# Altium footprint library macropad1.PcbLib: 4 footprints
Each footprint in its own frame and in the unit in brackets; x right, y up, seen from the top. Pads: shape width x height; smd on the part's side, far side on the other; paste and mask are expansions set on the pad; w line width, h text height; cw(c..) or ccw(c..) is an arc to the next point about the centre after c.
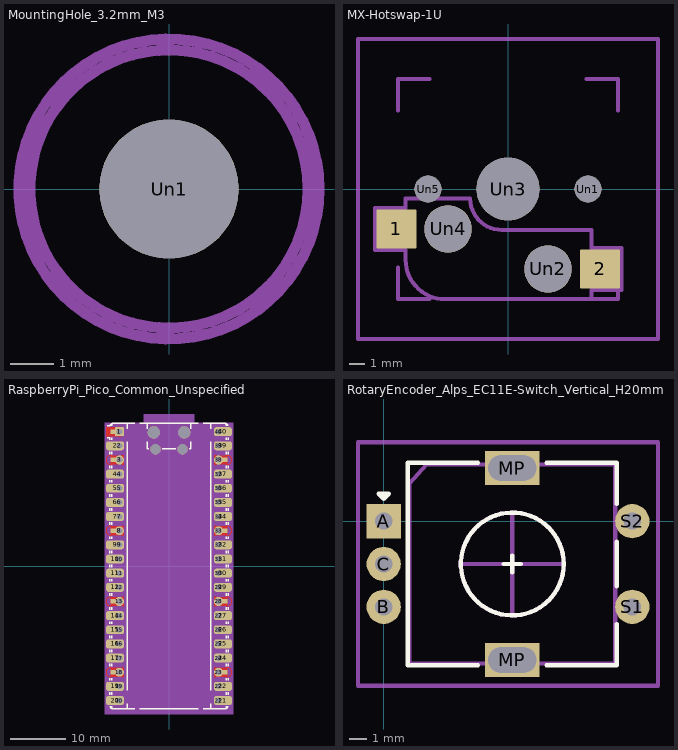
[diagram p0: the footprints below, top view; thin cyan lines are the x and y axes]

## MountingHole_3.2mm_M3 [mm]
pads (1):
  round 3.2 hole 3.2 paste-2539.97 mask+0: Un1(0,0)
Mechanical 6:
  text "'.Designator'" at -0.694,-0.28 h1
Mechanical 7:
  circle w0.254: c0,0 r3.45
Mechanical 12:
  circle w0.254: c0,0 r3.2

## MX-Hotswap-1U [mm]
pads (7):
  rrect8% 2.55x2.5 smd mask+0: 1(-7.085,-2.54) 2(5.842,-5.08)
  round 1.702 hole 1.702 paste-2539.97 mask+0: Un1(5.08,0) Un5(-5.08,0)
  round 3 hole 3 paste-2539.97 mask+0: Un2(2.54,-5.08) Un4(-3.81,-2.54)
  round 3.988 hole 3.988 paste-2539.97 mask+0: Un3(0,0)
Mechanical 8:
  lines w0.254: -8.45,-3.875 -6.5,-3.875 -6.5,-4.5 ccw(c-4,-4.5) -4,-7 5.3,-7 5.3,-6.4 7.2,-6.4 7.2,-3.75 5.3,-3.75 5.3,-2.6 -0.4,-2.6 cw(c-0.4,-0.6) -2.4,-0.6 -6.5,-0.6 -6.5,-1.2 -8.45,-1.2 -8.45,-3.875
Mechanical 13:
  lines w0.254: -7,-5 -7,-7 -5,-7 ; -7,5 -7,7 -5,7 ; 5,-7 7,-7 7,-5 ; 5,7 7,7 7,5 ; -9.525,-9.525 9.525,-9.525 9.525,9.525 -9.525,9.525 -9.525,-9.525

## RaspberryPi_Pico_Common_Unspecified [mm]
pads (84):
  rect 1.6x0.8 smd paste-1.6 mask+0: 1(-9.69,24.13) 3(-9.69,19.05) 8(-9.69,6.35) 13(-9.69,-6.35) 18(-9.69,-19.05) 23(9.69,-19.05) 28(9.69,-6.35) 33(9.69,6.35) 38(9.69,19.05)
  rrect12% 1.6x1.6 hole 1 paste-2539.97 mask+0: 1(-8.89,24.13)
  rrect50% 3.2x1.6 smd paste-3.2 mask+0: 2(-9.69,21.59) 4(-9.69,16.51) 5(-9.69,13.97) 6(-9.69,11.43) 7(-9.69,8.89) 9(-9.69,3.81) 10(-9.69,1.27) 11(-9.69,-1.27) 12(-9.69,-3.81) 14(-9.69,-8.89) 15(-9.69,-11.43) 16(-9.69,-13.97) 17(-9.69,-16.51) 19(-9.69,-21.59) 20(-9.69,-24.13) 21(9.69,-24.13) 22(9.69,-21.59) 24(9.69,-16.51) 25(9.69,-13.97) 26(9.69,-11.43) 27(9.69,-8.89) 29(9.69,-3.81) 30(9.69,-1.27) 31(9.69,1.27) 32(9.69,3.81) 34(9.69,8.89) 35(9.69,11.43) 36(9.69,13.97) 37(9.69,16.51) 39(9.69,21.59) 40(9.69,24.13)
  round 1.6 hole 1 paste-2539.97 mask+0: 2(-8.89,21.59) 3(-8.89,19.05) 4(-8.89,16.51) 5(-8.89,13.97) 6(-8.89,11.43) 7(-8.89,8.89) 8(-8.89,6.35) 9(-8.89,3.81) 10(-8.89,1.27) 11(-8.89,-1.27) 12(-8.89,-3.81) 13(-8.89,-6.35) 14(-8.89,-8.89) 15(-8.89,-11.43) 16(-8.89,-13.97) 17(-8.89,-16.51) 18(-8.89,-19.05) 19(-8.89,-21.59) 20(-8.89,-24.13) 21(8.89,-24.13) 22(8.89,-21.59) 23(8.89,-19.05) 24(8.89,-16.51) 25(8.89,-13.97) 26(8.89,-11.43) 27(8.89,-8.89) 28(8.89,-6.35) 29(8.89,-3.81) 30(8.89,-1.27) 31(8.89,1.27) 32(8.89,3.81) 33(8.89,6.35) 34(8.89,8.89) 35(8.89,11.43) 36(8.89,13.97) 37(8.89,16.51) 38(8.89,19.05) 39(8.89,21.59) 40(8.89,24.13)
  round 2.2 hole 2.2 paste-2539.97 mask+0: Un1(-2.725,24) Un4(2.725,24)
  round 1.85 hole 1.85 paste-2539.97 mask+0: Un2(-2.425,20.97) Un3(2.425,20.97)
Top Layer:
  circle w0: c-8.89,24.13 r0.8
  circle w0: c-11.09,24.73 r0.2
  circle w0: c-11.09,23.53 r0.2
  circle w0: c-10.49,19.05 r0.8
  circle w0: c-8.29,19.65 r0.2
  circle w0: c-8.29,18.45 r0.2
  circle w0: c-8.29,18.45 r0.2
  circle w0: c-8.29,19.65 r0.2
  circle w0: c-10.49,6.35 r0.8
  circle w0: c-8.29,6.95 r0.2
  circle w0: c-8.29,5.75 r0.2
  circle w0: c-8.29,5.75 r0.2
  circle w0: c-8.29,6.95 r0.2
  circle w0: c-10.49,-6.35 r0.8
  circle w0: c-8.29,-5.75 r0.2
  circle w0: c-8.29,-6.95 r0.2
  circle w0: c-8.29,-6.95 r0.2
  circle w0: c-8.29,-5.75 r0.2
  circle w0: c-10.49,-19.05 r0.8
  circle w0: c-8.29,-18.45 r0.2
  circle w0: c-8.29,-19.65 r0.2
  circle w0: c-8.29,-19.65 r0.2
  circle w0: c-8.29,-18.45 r0.2
  circle w0: c8.29,-19.65 r0.2
  circle w0: c8.29,-18.45 r0.2
  circle w0: c10.49,-19.05 r0.8
  circle w0: c8.29,-18.45 r0.2
  circle w0: c8.29,-19.65 r0.2
  circle w0: c8.29,-6.95 r0.2
  circle w0: c8.29,-5.75 r0.2
  circle w0: c10.49,-6.35 r0.8
  circle w0: c8.29,-5.75 r0.2
  circle w0: c8.29,-6.95 r0.2
  circle w0: c8.29,5.75 r0.2
  circle w0: c8.29,6.95 r0.2
  circle w0: c10.49,6.35 r0.8
  circle w0: c8.29,6.95 r0.2
  circle w0: c8.29,5.75 r0.2
  circle w0: c8.29,18.45 r0.2
  circle w0: c8.29,19.65 r0.2
  circle w0: c10.49,19.05 r0.8
  circle w0: c8.29,19.65 r0.2
  circle w0: c8.29,18.45 r0.2
  region: -8.89,23.33 -11.09,23.33 -11.29,23.53 -11.29,24.73 -11.09,24.93 -8.89,24.93
  region: -8.09,19.65 -8.09,18.45 -8.29,18.25 -10.49,18.25 -10.49,19.85 -8.29,19.85
  region: -8.09,19.65 -8.09,18.45 -8.29,18.25 -8.89,18.25 -8.89,19.85 -8.29,19.85
  region: -8.09,6.95 -8.09,5.75 -8.29,5.55 -10.49,5.55 -10.49,7.15 -8.29,7.15
  region: -8.09,6.95 -8.09,5.75 -8.29,5.55 -8.89,5.55 -8.89,7.15 -8.29,7.15
  region: -8.09,-5.75 -8.09,-6.95 -8.29,-7.15 -10.49,-7.15 -10.49,-5.55 -8.29,-5.55
  region: -8.09,-5.75 -8.09,-6.95 -8.29,-7.15 -8.89,-7.15 -8.89,-5.55 -8.29,-5.55
  region: -8.09,-18.45 -8.09,-19.65 -8.29,-19.85 -10.49,-19.85 -10.49,-18.25 -8.29,-18.25
  region: -8.09,-18.45 -8.09,-19.65 -8.29,-19.85 -8.89,-19.85 -8.89,-18.25 -8.29,-18.25
  region: 8.89,-19.85 8.29,-19.85 8.09,-19.65 8.09,-18.45 8.29,-18.25 8.89,-18.25
  region: 10.49,-19.85 8.29,-19.85 8.09,-19.65 8.09,-18.45 8.29,-18.25 10.49,-18.25
  region: 8.89,-7.15 8.29,-7.15 8.09,-6.95 8.09,-5.75 8.29,-5.55 8.89,-5.55
  region: 10.49,-7.15 8.29,-7.15 8.09,-6.95 8.09,-5.75 8.29,-5.55 10.49,-5.55
  region: 8.89,5.55 8.29,5.55 8.09,5.75 8.09,6.95 8.29,7.15 8.89,7.15
  region: 10.49,5.55 8.29,5.55 8.09,5.75 8.09,6.95 8.29,7.15 10.49,7.15
  region: 8.89,18.25 8.29,18.25 8.09,18.45 8.09,19.65 8.29,19.85 8.89,19.85
  region: 10.49,18.25 8.29,18.25 8.09,18.45 8.09,19.65 8.29,19.85 10.49,19.85
Bottom Layer:
  circle w0: c-8.29,18.45 r0.2
  circle w0: c-8.29,19.65 r0.2
  circle w0: c-8.29,5.75 r0.2
  circle w0: c-8.29,6.95 r0.2
  circle w0: c-8.29,-6.95 r0.2
  circle w0: c-8.29,-5.75 r0.2
  circle w0: c-8.29,-19.65 r0.2
  circle w0: c-8.29,-18.45 r0.2
  circle w0: c8.29,-19.65 r0.2
  circle w0: c8.29,-18.45 r0.2
  circle w0: c8.29,-6.95 r0.2
  circle w0: c8.29,-5.75 r0.2
  circle w0: c8.29,5.75 r0.2
  circle w0: c8.29,6.95 r0.2
  circle w0: c8.29,18.45 r0.2
  circle w0: c8.29,19.65 r0.2
  region: -8.09,19.65 -8.09,18.45 -8.29,18.25 -8.89,18.25 -8.89,19.85 -8.29,19.85
  region: -8.09,6.95 -8.09,5.75 -8.29,5.55 -8.89,5.55 -8.89,7.15 -8.29,7.15
  region: -8.09,-5.75 -8.09,-6.95 -8.29,-7.15 -8.89,-7.15 -8.89,-5.55 -8.29,-5.55
  region: -8.09,-18.45 -8.09,-19.65 -8.29,-19.85 -8.89,-19.85 -8.89,-18.25 -8.29,-18.25
  region: 8.89,-19.85 8.29,-19.85 8.09,-19.65 8.09,-18.45 8.29,-18.25 8.89,-18.25
  region: 8.89,-7.15 8.29,-7.15 8.09,-6.95 8.09,-5.75 8.29,-5.55 8.89,-5.55
  region: 8.89,5.55 8.29,5.55 8.09,5.75 8.09,6.95 8.29,7.15 8.89,7.15
  region: 8.89,18.25 8.29,18.25 8.09,18.45 8.09,19.65 8.29,19.85 8.89,19.85
Top Overlay:
  lines w0.254: -11.09,23.07 -10.61,23.07 -10.61,22.65 ; -11.09,25.19 -10.58,25.19 cw(c-10,25) -10,25.61 -7.51,25.61 ; -10.61,-23.07 -10.61,-22.65 ; -10.61,-20.53 -10.61,-20.11 ; -10.61,-17.99 -10.61,-17.57 ; -10.61,-15.45 -10.61,-15.03 ; -10.61,-12.91 -10.61,-12.49 ; -10.61,-10.37 -10.61,-9.95 ; -10.61,-7.83 -10.61,-7.41 ; -10.61,-5.29 -10.61,-4.87 ; -10.61,-2.75 -10.61,-2.33 ; -10.61,-0.21 -10.61,0.21 ; -10.61,2.33 -10.61,2.75 ; -10.61,4.87 -10.61,5.29 ; -10.61,7.41 -10.61,7.83 ; -10.61,9.95 -10.61,10.37 ; -10.61,12.49 -10.61,12.91 ; -10.61,15.03 -10.61,15.45 ; -10.61,17.57 -10.61,17.99 ; -10.61,20.11 -10.61,20.53 ; -10.58,-25.19 ccw(c-10,-25) -10,-25.61 -6.162,-25.61 ; -10.27,-25.547 -10.27,-25.19 ; -10.27,-23.07 -10.27,-22.65 ; -10.27,-20.53 -10.27,-20.11 ; -10.27,-17.99 -10.27,-17.57 ; -10.27,-15.45 -10.27,-15.03 ; -10.27,-12.91 -10.27,-12.49 ; -10.27,-10.37 -10.27,-9.95 ; -10.27,-7.83 -10.27,-7.41 ; -10.27,-5.29 -10.27,-4.87 ; -10.27,-2.75 -10.27,-2.33 ; -10.27,-0.21 -10.27,0.21 ; -10.27,2.33 -10.27,2.75 ; -10.27,4.87 -10.27,5.29 ; -10.27,7.41 -10.27,7.83 ; -10.27,9.95 -10.27,10.37 ; -10.27,12.49 -10.27,12.91 ; -10.27,15.03 -10.27,15.45 ; -10.27,17.57 -10.27,17.99 ; -10.27,20.11 -10.27,20.53 ; -10.27,22.65 -10.27,23.07 ; -10.27,25.19 -10.27,25.547 ; -7.51,-25.61 -7.51,-24.696 ; -7.51,-22.304 -7.51,22.304 ; -7.51,24.696 -7.51,25.61 ; -6.162,25.61 -7.51,25.61 ; -5.238,-25.61 -3.6,-25.61 3.6,-25.61 5.238,-25.61 ; -5.238,25.61 -4.235,25.61 4.235,25.61 5.238,25.61 ; -3.9,22.306 -3.9,21.09 -3.604,21.09 ; -3.9,24.694 -3.9,25.61 ; -1.246,21.09 1.246,21.09 ; 3.604,21.09 3.9,21.09 3.9,22.306 ; 3.9,24.694 3.9,25.61 ; 6.162,-25.61 10,-25.61 ccw(c10,-25) 10.58,-25.19 ; 6.162,25.61 7.51,25.61 ; 7.51,-25.61 7.51,-24.696 ; 7.51,-22.304 7.51,22.304 ; 7.51,24.696 7.51,25.61 ; 10.27,-25.547 10.27,-25.19 ; 10.27,-23.07 10.27,-22.65 ; 10.27,-20.53 10.27,-20.11 ; 10.27,-17.99 10.27,-17.57 ; 10.27,-15.45 10.27,-15.03 ; 10.27,-12.91 10.27,-12.49 ; 10.27,-10.37 10.27,-9.95 ; 10.27,-7.83 10.27,-7.41 ; 10.27,-5.29 10.27,-4.87 ; 10.27,-2.75 10.27,-2.33 ; 10.27,-0.21 10.27,0.21 ; 10.27,2.33 10.27,2.75 ; 10.27,4.87 10.27,5.29 ; 10.27,7.41 10.27,7.83 ; 10.27,9.95 10.27,10.37 ; 10.27,12.49 10.27,12.91 ; 10.27,15.03 10.27,15.45 ; 10.27,17.57 10.27,17.99 ; 10.27,20.11 10.27,20.53 ; 10.27,22.65 10.27,23.07 ; 10.27,25.19 10.27,25.547 ; 10.58,25.19 ccw(c10,25) 10,25.61 7.51,25.61 ; 10.61,-23.07 10.61,-22.65 ; 10.61,-20.53 10.61,-20.11 ; 10.61,-17.99 10.61,-17.57 ; 10.61,-15.45 10.61,-15.03 ; 10.61,-12.91 10.61,-12.49 ; 10.61,-10.37 10.61,-9.95 ; 10.61,-7.83 10.61,-7.41 ; 10.61,-5.29 10.61,-4.87 ; 10.61,-2.75 10.61,-2.33 ; 10.61,-0.21 10.61,0.21 ; 10.61,2.33 10.61,2.75 ; 10.61,4.87 10.61,5.29 ; 10.61,7.41 10.61,7.83 ; 10.61,9.95 10.61,10.37 ; 10.61,12.49 10.61,12.91 ; 10.61,15.03 10.61,15.45 ; 10.61,17.57 10.61,17.99 ; 10.61,20.11 10.61,20.53 ; 10.61,22.65 10.61,23.07
Top Solder:
  circle w0: c-8.89,24.13 r0.8
  circle w0: c-11.09,24.73 r0.2
  circle w0: c-11.09,23.53 r0.2
  circle w0: c-10.49,19.05 r0.8
  circle w0: c-8.29,19.65 r0.2
  circle w0: c-8.29,18.45 r0.2
  circle w0: c-8.29,18.45 r0.2
  circle w0: c-8.29,19.65 r0.2
  circle w0: c-10.49,6.35 r0.8
  circle w0: c-8.29,6.95 r0.2
  circle w0: c-8.29,5.75 r0.2
  circle w0: c-8.29,5.75 r0.2
  circle w0: c-8.29,6.95 r0.2
  circle w0: c-10.49,-6.35 r0.8
  circle w0: c-8.29,-5.75 r0.2
  circle w0: c-8.29,-6.95 r0.2
  circle w0: c-8.29,-6.95 r0.2
  circle w0: c-8.29,-5.75 r0.2
  circle w0: c-10.49,-19.05 r0.8
  circle w0: c-8.29,-18.45 r0.2
  circle w0: c-8.29,-19.65 r0.2
  circle w0: c-8.29,-19.65 r0.2
  circle w0: c-8.29,-18.45 r0.2
  circle w0: c8.29,-19.65 r0.2
  circle w0: c8.29,-18.45 r0.2
  circle w0: c10.49,-19.05 r0.8
  circle w0: c8.29,-18.45 r0.2
  circle w0: c8.29,-19.65 r0.2
  circle w0: c8.29,-6.95 r0.2
  circle w0: c8.29,-5.75 r0.2
  circle w0: c10.49,-6.35 r0.8
  circle w0: c8.29,-5.75 r0.2
  circle w0: c8.29,-6.95 r0.2
  circle w0: c8.29,5.75 r0.2
  circle w0: c8.29,6.95 r0.2
  circle w0: c10.49,6.35 r0.8
  circle w0: c8.29,6.95 r0.2
  circle w0: c8.29,5.75 r0.2
  circle w0: c8.29,18.45 r0.2
  circle w0: c8.29,19.65 r0.2
  circle w0: c10.49,19.05 r0.8
  circle w0: c8.29,19.65 r0.2
  circle w0: c8.29,18.45 r0.2
  region: -8.89,23.33 -11.09,23.33 -11.29,23.53 -11.29,24.73 -11.09,24.93 -8.89,24.93
  region: -8.09,19.65 -8.09,18.45 -8.29,18.25 -10.49,18.25 -10.49,19.85 -8.29,19.85
  region: -8.09,19.65 -8.09,18.45 -8.29,18.25 -8.89,18.25 -8.89,19.85 -8.29,19.85
  region: -8.09,6.95 -8.09,5.75 -8.29,5.55 -10.49,5.55 -10.49,7.15 -8.29,7.15
  region: -8.09,6.95 -8.09,5.75 -8.29,5.55 -8.89,5.55 -8.89,7.15 -8.29,7.15
  region: -8.09,-5.75 -8.09,-6.95 -8.29,-7.15 -10.49,-7.15 -10.49,-5.55 -8.29,-5.55
  region: -8.09,-5.75 -8.09,-6.95 -8.29,-7.15 -8.89,-7.15 -8.89,-5.55 -8.29,-5.55
  region: -8.09,-18.45 -8.09,-19.65 -8.29,-19.85 -10.49,-19.85 -10.49,-18.25 -8.29,-18.25
  region: -8.09,-18.45 -8.09,-19.65 -8.29,-19.85 -8.89,-19.85 -8.89,-18.25 -8.29,-18.25
  region: 8.89,-19.85 8.29,-19.85 8.09,-19.65 8.09,-18.45 8.29,-18.25 8.89,-18.25
  region: 10.49,-19.85 8.29,-19.85 8.09,-19.65 8.09,-18.45 8.29,-18.25 10.49,-18.25
  region: 8.89,-7.15 8.29,-7.15 8.09,-6.95 8.09,-5.75 8.29,-5.55 8.89,-5.55
  region: 10.49,-7.15 8.29,-7.15 8.09,-6.95 8.09,-5.75 8.29,-5.55 10.49,-5.55
  region: 8.89,5.55 8.29,5.55 8.09,5.75 8.09,6.95 8.29,7.15 8.89,7.15
  region: 10.49,5.55 8.29,5.55 8.09,5.75 8.09,6.95 8.29,7.15 10.49,7.15
  region: 8.89,18.25 8.29,18.25 8.09,18.45 8.09,19.65 8.29,19.85 8.89,19.85
  region: 10.49,18.25 8.29,18.25 8.09,18.45 8.09,19.65 8.29,19.85 10.49,19.85
Bottom Solder:
  circle w0: c-8.29,18.45 r0.2
  circle w0: c-8.29,19.65 r0.2
  circle w0: c-8.29,5.75 r0.2
  circle w0: c-8.29,6.95 r0.2
  circle w0: c-8.29,-6.95 r0.2
  circle w0: c-8.29,-5.75 r0.2
  circle w0: c-8.29,-19.65 r0.2
  circle w0: c-8.29,-18.45 r0.2
  circle w0: c8.29,-19.65 r0.2
  circle w0: c8.29,-18.45 r0.2
  circle w0: c8.29,-6.95 r0.2
  circle w0: c8.29,-5.75 r0.2
  circle w0: c8.29,5.75 r0.2
  circle w0: c8.29,6.95 r0.2
  circle w0: c8.29,18.45 r0.2
  circle w0: c8.29,19.65 r0.2
  region: -8.09,19.65 -8.09,18.45 -8.29,18.25 -8.89,18.25 -8.89,19.85 -8.29,19.85
  region: -8.09,6.95 -8.09,5.75 -8.29,5.55 -8.89,5.55 -8.89,7.15 -8.29,7.15
  region: -8.09,-5.75 -8.09,-6.95 -8.29,-7.15 -8.89,-7.15 -8.89,-5.55 -8.29,-5.55
  region: -8.09,-18.45 -8.09,-19.65 -8.29,-19.85 -8.89,-19.85 -8.89,-18.25 -8.29,-18.25
  region: 8.89,-19.85 8.29,-19.85 8.09,-19.65 8.09,-18.45 8.29,-18.25 8.89,-18.25
  region: 8.89,-7.15 8.29,-7.15 8.09,-6.95 8.09,-5.75 8.29,-5.55 8.89,-5.55
  region: 8.89,5.55 8.29,5.55 8.09,5.75 8.09,6.95 8.29,7.15 8.89,7.15
  region: 8.89,18.25 8.29,18.25 8.09,18.45 8.09,19.65 8.29,19.85 8.89,19.85
Mechanical 6:
  region: 4,26.2 3.79,26.2 3.79,21.2 -3.79,21.2 -3.79,26.2 -4,26.2 -4,26.8 4,26.8
  lines w0.254: -10.5,-25 ccw(c-10,-25) -10,-25.5 10,-25.5 ccw(c10,-25) 10.5,-25 10.5,25 ccw(c10,25) 10,25.5 -9.5,25.5 -10.5,24.5 -10.5,-25 ; -6.5,20.3 -6.5,21.1 -4.9,21.1 -4.9,20.3 -6.5,20.3 ; -6.2,20.3 -6.2,21.1 -5.2,21.1 -5.2,20.3 -6.2,20.3 ; -5.1,11.375 -5.1,15.625 -1.9,15.625 -1.9,11.375 -5.1,11.375 ; -4.625,12.925 ccw(c-3.5,12.925) -2.375,12.925 -2.375,14.075 ccw(c-3.5,14.075) -4.625,14.075 -4.625,12.925
Mechanical 7:
  region: 4.5,25.75 11.54,25.75 11.54,-26.55 -11.54,-26.55 -11.54,25.75 -4.5,25.75 -4.5,27.3 4.5,27.3
Mechanical 12:
  text "USB Cable" at -0.278,49.644 h1
  text "Keep Out" at -0.816,36.945 h1
  text "Exposed" at -0.038,25.622 h0.33
  text "Copper" at 0,24.986 h0.33
  text "Keep" at 0.094,22.322 h0.33
  text "Out" at 0.133,21.717 h0.33
  text "Exposed Copper Keep Out" at -2.361,16.422 h0.33
  text "AGND Plane" at 5.203,9.463 h0.5
  text "Copper" at 1,6.638 h0.33
  text "Keep" at 1.094,6.005 h0.33
  text "Out" at 1.133,5.4 h0.33
  text "Exposed Copper Keep Out" at 2.348,-4.697 h0.33
  text "Possible Antenna" at -2.094,-15.356 h1
  text "Keep Out" at -0.816,-20.84 h1
  text "Exposed Copper Keep Out" at -0.776,-23.762 h0.33
Mechanical 13:
  circle w0.254: c5.7,23.5 r1.05
  circle w0.254: c-5.7,23.5 r1.05
  circle w0.254: c5.7,-23.5 r1.05
  circle w0.254: c-5.7,-23.5 r1.05
  region: 10.5,0.47 2.12,0.47 1.9,0.7 1.9,1.6 2.37,2.07 5.65,2.07 5.9,2.3 5.9,3.2 5.2,3.9 4.55,3.9 4.3,4.15 4.3,11.05 4.85,11.6 7.15,11.6 7.78,12.23 10.5,12.23

## RotaryEncoder_Alps_EC11E-Switch_Vertical_H20mm [mm]
pads (7):
  rect 2x2 hole 1 paste-2539.97 mask+0: A(0,0)
  round 2 hole 1 paste-2539.97 mask+0: B(0,-5) C(0,-2.5) S1(14.5,-5) S2(14.5,0)
  rect 3.2x2 hole 1.5 slot 2.8 at 0 deg paste-2539.97 mask+0: MP(7.5,-8.1) MP(7.5,3.1)
Top Overlay:
  circle w0.254: c7.5,-2.5 r3
  lines w0.254: 5.5,-8.4 1.4,-8.4 1.4,3.4 5.5,3.4 ; 7,-2.5 8,-2.5 ; 7.5,-3 7.5,-2 ; 9.5,-8.4 13.6,-8.4 13.6,-6 ; 9.5,3.4 13.6,3.4 13.6,1 ; 13.6,-3.8 13.6,-1.2 ; -0.3,1.6 0.3,1.6 0,1.3 -0.3,1.6
Mechanical 6:
  circle w0.254: c7.5,-2.5 r3
  lines w0.254: 4.5,-2.5 10.5,-2.5 ; 7.5,-5.5 7.5,0.5 ; 1.5,-8.3 1.5,2.2 2.5,3.3 13.5,3.3 13.5,-8.3 1.5,-8.3
  text "'.Designator'" at 9.15,-6.629 h1
Mechanical 7:
  lines w0.254: -1.5,-9.6 -1.5,4.6 16,4.6 16,-9.6 -1.5,-9.6